# EAGLE library part SYN-USBC-16P (library synthetic_all)
SYN-USBC-16P Synthetic USB Type-C receptacle, 16 pin Source: JLCEDA/EasyEDA Official Library (https://lceda.cn/ , https://easyeda.com). Copyright of the library data belongs to JLCEDA/EasyEDA.
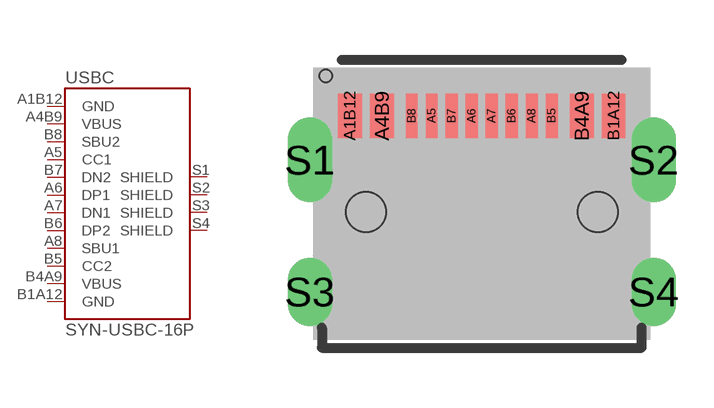
[diagram p7: symbol with the pads of SYN-USB-C-SMD-16P; footprint SYN-USB-C-SMD-16P]

Designator prefix USBC

## SYN-USBC-16P (JLCPCB_CLASS: Extended Part; LCSC_PACKAGE: SYN-USB-C-SMD-16P; LCSC_PART: C9000009; MANUFACTURER: SYN-Maker; MPN: SYN-USBC-16P; SOURCE: Source: JLCEDA/EasyEDA Official Library (https://lceda.cn/ , https://easyeda.com). Copyright of the library data belongs to JLCEDA/EasyEDA.)  [SYN-USB-C-SMD-16P]
A1B12  GND  pwr
A4B9  VBUS  pwr
A5  CC1
A6  DP1
A7  DN1
A8  SBU1
B1A12  GND  pwr
B4A9  VBUS  pwr
B5  CC2
B6  DP2
B7  DN2
B8  SBU2
S1  SHIELD  pas
S2  SHIELD  pas
S3  SHIELD  pas
S4  SHIELD  pas

## Footprint SYN-USB-C-SMD-16P (pad centres in mm)
SYN-USB-C-SMD-16P
smd 0.6 x 1.1: A1B12 -3.3,1.2; A4B9 -2.5,1.2; B1A12 3.3,1.2; B4A9 2.5,1.2
smd 0.3 x 1.1: A5 -1.25,1.2; A6 -0.25,1.2; A7 0.25,1.2; A8 1.25,1.2; B5 1.75,1.2; B6 0.75,1.2; B7 -0.75,1.2; B8 -1.75,1.2
drill 0.6 pad 1 slot 1.6 rotated 90: S1 -4.3,0.1; S2 4.3,0.1
drill 0.6 pad 1 slot 1.2 rotated 90: S3 -4.3,-3.2; S4 4.3,-3.2
hole 1 at -2.9,-1.2
hole 1 at 2.9,-1.2